# Altium integrated library Big_Library_Fiducial_Marks.IntLib: 1 symbol
Pins are listed as number, name and electrical type; pins without a type are passive.

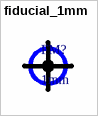
[diagram p0: symbol fiducial_1mm]

## fiducial_1mm
designator FM?, comment 1mm
Solder Mask Expansion: 2mm; Diameter: 1mm
footprint fiducial_1mm